# Altium schematic symbol library BasicScheLib.SchLib: 17 symbols
Pins are listed as number, name and electrical type; pins without a type are passive.

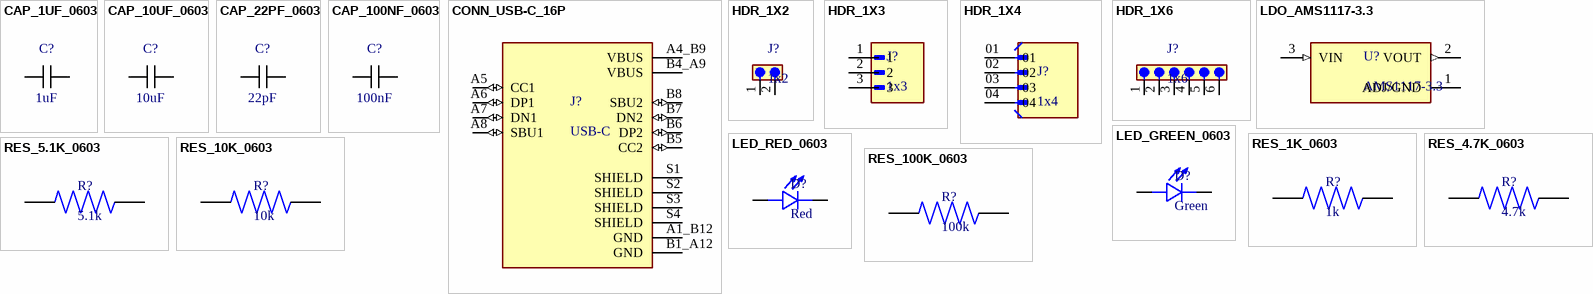
[diagram p0: symbols CAP_1UF_0603 to RES_100K_0603]

## CAP_1UF_0603
designator C?, comment 1uF
Capacitor 1µF 25V X5R 0603; Manufacturer: Samsung; MPN: CL10A105KB8NNNC; Value: 1uF; LCSC: C15849
footprint CAPC1608X90N
pins: 1, 2

## CAP_10UF_0603
designator C?, comment 10uF
Capacitor 10µF 10V X5R 0603; Manufacturer: Samsung; MPN: CL10A106KP8NNNC; Value: 10uF; LCSC: C19702
footprint CAPC1608X90N
pins: 1, 2

## CAP_22PF_0603
designator C?, comment 22pF
Capacitor 22pF 50V C0G 0603; Manufacturer: Samsung; MPN: CL10C220JB8NNNC; Value: 22pF; LCSC: C1653
footprint CAPC1608X90N
pins: 1, 2

## CAP_100NF_0603
designator C?, comment 100nF
Capacitor 100nF 50V X7R 0603; Manufacturer: Yageo; MPN: CC0603KRX7R9BB104; Value: 100nF; LCSC: C14663
footprint CAPC1608X90N
pins: 1, 2

## CONN_USB-C_16P
designator J?, comment USB-C
USB Type-C Receptacle 16-Pin USB 2.0 SMD; Manufacturer: Korean Hroparts; MPN: TYPE-C-31-M-12; Value: USB-C; LCSC: C165948
footprint USB-C_16P_TYPE-C-31-M-12
pins: A1_B12 GND (power), A4_B9 VBUS (power), A5 CC1 (io), A6 DP1 (io), A7 DN1 (io), A8 SBU1 (io), B1_A12 GND (power), B4_A9 VBUS (power), B5 CC2 (io), B6 DP2 (io), B7 DN2 (io), B8 SBU2 (io), S1 SHIELD, S2 SHIELD, S3 SHIELD, S4 SHIELD

## HDR_1X2
designator J?, comment 1x2
Pin Header 1x2 2.54mm Male Vertical; Manufacturer: Würth Elektronik; MPN: 61300211121; Value: 1x2
footprint HDR_1X2_P2.54
pins: 1, 2

## HDR_1X3
designator J?, comment 1x3
Pin Header 1x3 2.54mm Male Vertical; Manufacturer: Würth Elektronik; MPN: 61300311121; Value: 1x3
footprint HDR_1X3_P2.54
pins: 1, 2, 3

## HDR_1X4
designator J?, comment 1x4
Pin Header 1x4 2.54mm Male Vertical; Manufacturer: Würth Elektronik; MPN: 61300411121; Value: 1x4
footprint HDR_1X4_P2.54
pins: 01, 02, 03, 04

## HDR_1X6
designator J?, comment 1x6
Pin Header 1x6 2.54mm Male Vertical; Manufacturer: Würth Elektronik; MPN: 61300611121; Value: 1x6
footprint HDR_1X6_P2.54
pins: 1, 2, 3, 4, 5, 6

## LDO_AMS1117-3.3
designator U?, comment AMS1117-3.3
LDO Regulator 3.3V 1A SOT-223; Manufacturer: Advanced Monolithic Systems; Value: AMS1117-3.3; MPN: AMS1117-3.3; LCSC: C6186
footprint SOT-223
pins: 1 ADJ/GND (power), 2 VOUT (out), 3 VIN (in)

## LED_GREEN_0603
designator D?, comment Green
LED Green 0603; Manufacturer: Hubei KENTO; MPN: KT-0603G; Value: Green; LCSC: C12624
footprint LED_0603
pins: 1 A, 2 C

## LED_RED_0603
designator D?, comment Red
LED Red 0603; Manufacturer: Hubei KENTO; MPN: KT-0603R; Value: Red; LCSC: C2286
footprint LED_0603
pins: 1 A, 2 C

## RES_1K_0603
designator R?, comment 1k
Resistor 1kΩ 1% 0603; Manufacturer: UNI-ROYAL; MPN: 0603WAF1001T5E; LCSC: C21190; Value: 1k
footprint RESC1608X55N
pins: 1, 2

## RES_4.7K_0603
designator R?, comment 4.7k
Resistor 4.7kΩ 1% 0603; Manufacturer: UNI-ROYAL; MPN: 0603WAF4701T5E; LCSC: C23162; Value: 4.7k
footprint RESC1608X55N
pins: 1, 2

## RES_5.1K_0603
designator R?, comment 5.1k
Resistor 5.1kΩ 1% 0603; Manufacturer: UNI-ROYAL; MPN: 0603WAF5101T5E; LCSC: C23186; Value: 5.1k
footprint RESC1608X55N
pins: 1, 2

## RES_10K_0603
designator R?, comment 10k
Resistor 10kΩ 1% 0603; Manufacturer: UNI-ROYAL; MPN: 0603WAF1002T5E; LCSC: C25804; Value: 10k
footprint RESC1608X55N
pins: 1, 2

## RES_100K_0603
designator R?, comment 100k
Resistor 100kΩ 1% 0603; Manufacturer: UNI-ROYAL; MPN: 0603WAF1003T5E; LCSC: C25803; Value: 100k
footprint RESC1608X55N
pins: 1, 2